# Altium schematic symbol library 2020-12-05_19-42-01.SchLib: 2 symbols
Pins are listed as number, name and electrical type; pins without a type are passive.

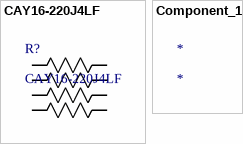
[diagram p0: symbols CAY16-220J4LF to Component_1]

## CAY16-220J4LF
designator R?
No Description Available; Vendor: Bourns Electronics; Built_By: EMA_UL_Team; Manufacturer_Part_Number: CAY16-220J4LF; Copyright: Copyright (C) 2018 Accelerated Designs. All rights reserved; RefDes: RefDes; Type: DEV
footprint BO_CAY16
pins: 1, 2, 3, 4, 5, 6, 7, 8

## Component_1
designator *